# Altium footprint library MasterLib.PcbLib: 54 footprints (part 1 of 4)
Each footprint in its own frame and in the unit in brackets; x right, y up, seen from the top. Pads: shape width x height; smd on the part's side, far side on the other; paste and mask are expansions set on the pad; w line width, h text height; cw(c..) or ccw(c..) is an arc to the next point about the centre after c.
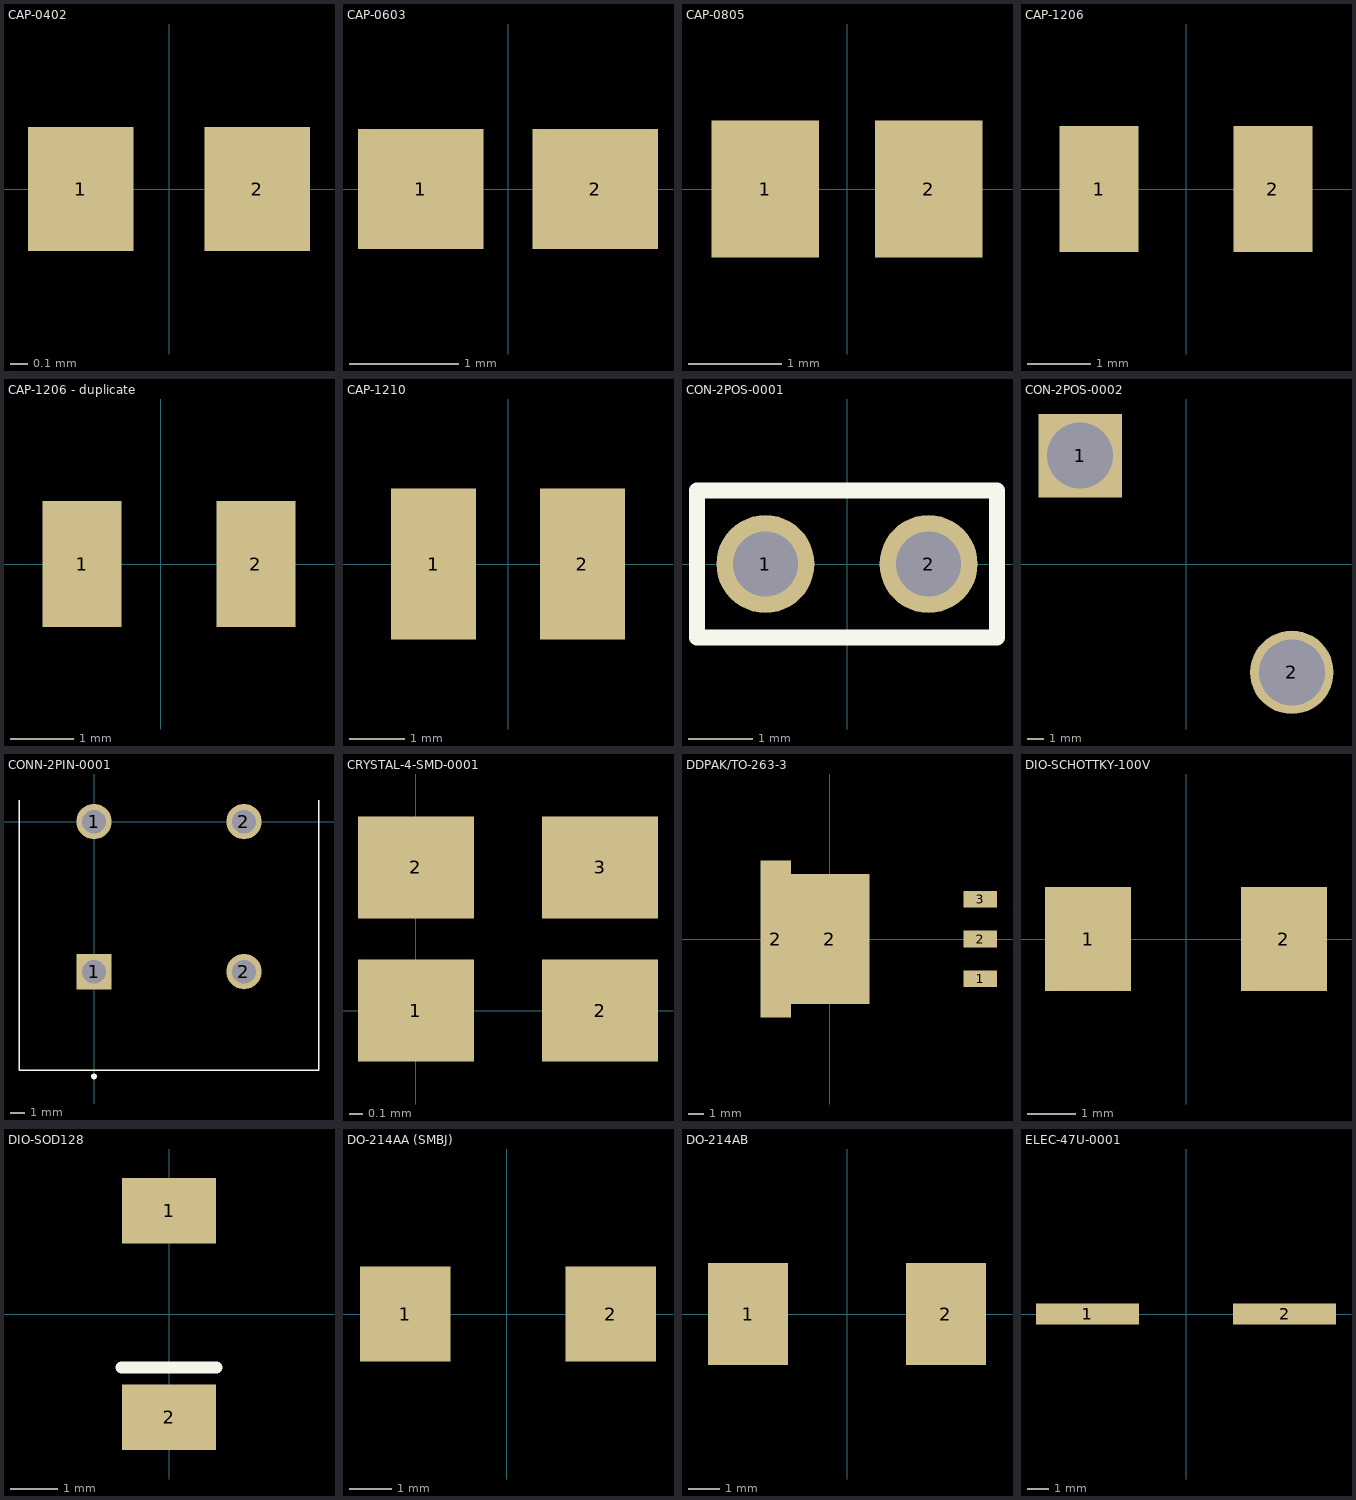
[diagram p0: the footprints below, top view; thin cyan lines are the x and y axes]

## CAP-0402 [mm]
pads (2):
  rect 0.6x0.7 smd: 1(-0.5,0) 2(0.5,0)
3D body "GRM155R71H162JA01J.STEP": height 0.5, standoff 0, extent -0.5,-0.225 0.5,0.225

## CAP-0603 [mm]
pads (2):
  rect 1.15x1.1 smd: 1(-0.8,0) 2(0.8,0)
3D body "LD033A221JAB2A.STEP": height 0.8, standoff -0.01, extent -0.8,-0.45 0.8,0.45

## CAP-0805 [mm]
pads (2):
  rect 1.16x1.47 smd: 1(-0.88,0) 2(0.88,0)
3D body "0805YC103J4T2A.STEP": height 0.94, standoff 0, extent -1.005,-0.625 1.005,0.625

## CAP-1206 [mm]
pads (2):
  rect 1.25x2 smd: 1(-1.375,0) 2(1.375,0)
3D body "GRM31A5C2E272JWA1D.STEP": height 1.5, standoff 0, extent -1.6,-0.8 1.6,0.8

## CAP-1206 - duplicate [mm]
pads (2):
  rect 1.25x2 smd: 1(-1.248,0) 2(1.502,0)
3D body "GRM31A5C2E272JWA1D.STEP": height 1.5, standoff 0, extent -1.473,-0.8 1.727,0.8

## CAP-1210 [mm]
pads (2):
  rect 1.53x2.72 smd: 1(-1.341,0) 2(1.341,0)
3D body "GRM32EC72A106KE05L.STEP": height 2.7, standoff 0, extent -1.6,-1.25 1.6,1.25

## CON-2POS-0001 [mil]
pads (2):
  round 60 hole 40: 1(-50,0) 2(50,0)
Top Overlay:
  lines w10: 91.93,-45 91.93,45 ; 91.93,-45 91.93,-45 ; 91.93,-45 -91.93,-45 -91.93,45 91.93,45 ; 91.93,45 91.93,45
3D body "103321-2--3DModel-STEP-1.STEP": height 418, standoff -115, extent -92,-46 92,46

## CON-2POS-0002 [mm]
pads (2):
  rect 5x5 hole 3.96: 1(-6.35,6.5)
  round 5 hole 3.96: 2(6.35,-6.5)
3D body "389690002.stp": height 22.61, standoff -4.06, extent -13.97,-12.09 13.97,9.5

## CONN-2PIN-0001 [mm]
pads (4):
  rect 2.4x2.4 hole 1.6: 1(0,-10.16)
  round 2.4 hole 1.6: 1(0,0) 2(10.16,-10.16) 2(10.16,0)
Top Overlay:
  lines w0.1: -5.08,1.46 -5.08,-16.84 15.24,-16.84 15.24,1.46
  lines w0.2: 0,-17.36 ccw(c0,-17.26) 0,-17.16 ccw(c0,-17.26) 0,-17.36

## CRYSTAL-4-SMD-0001 [mm]
pads (4):
  rect 0.85x0.75 smd: 1(0,0) 2(0,1.05) 2(1.35,0) 3(1.35,1.05)
3D body "ECS-240-6-37B-7KM-TR.STEP": height 0.5, standoff 0, extent -0.325,-0.275 1.675,1.325

## DDPAK/TO-263-3 [mm]
pads (5):
  rect 2.16x1.07 smd: 1(9.625,-2.54) 2(9.625,0) 3(9.625,2.54)
  rect 1.95x10.08 smd: 2(-3.469,0)
  rect 5.08x8.33 smd: 2(0,0)
3D body "NOPB.STEP": height 4.77, standoff -0.03, extent -4.176,-5.08 10.175,5.08

## DIO-SCHOTTKY-100V [mm]
pads (2):
  rect 1.78x2.16 smd: 1(-2.025,0) 2(2.025,0)

## DIO-SOD128 [mm]
pads (2):
  rect 2x1.4 smd: 1(0,2.2) 2(0,-2.2)
Top Overlay:
  lines w0.254: -1.016,-1.143 1.016,-1.143
3D body "RB081LAM-20TR--3DModel-STEP-56544.STEP": height 1.05, standoff 0, extent -1.25,-2.35 1.25,2.35

## DO-214AA (SMBJ) [mm]
pads (2):
  rect 2.16x2.26 smd: 1(-2.416,0) 2(2.484,0)
3D body "User Library-DIOM5539X24.STEP": height 2.45, standoff 0.03, extent -2.716,-1.95 2.784,1.95

## DO-214AB [mm]
pads (2):
  rect 2.5x3.2 smd: 1(-3.105,0) 2(3.105,0)
3D body "User Library-DO-214AB(SMC).STEP": height 2.67, standoff 0.03, extent -4.064,-3.15 4.064,3.15

## ELEC-47U-0001 [mm]
pads (2):
  rect 4.9x1 smd: 1(-4.7,0) 2(4.7,0)
3D body "EDH476M100A9PAA.step": height 10.21, standoff -0.3, extent -6.1,-5.25 6.1,5.25